# Altium integrated library FTSH-105-01-L-DV-007-K.IntLib: 1 symbol
Pins are listed as number, name and electrical type; pins without a type are passive.

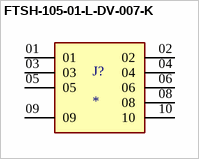
[diagram p0: symbol FTSH-105-01-L-DV-007-K]

## FTSH-105-01-L-DV-007-K
designator J?
Connector Header Surface Mount 10 position 0.050 (1.27mm); MF: Samtec; MP: FTSH-105-01-L-DV-007-K; SnapEDA_Link: https://www.snapeda.com/parts/FTSH-105-01-L-DV-007-K/Samtec+Inc./view-part/?ref=snap; Package: None; Value: *; Check_prices: https://www.snapeda.com/parts/FTSH-105-01-L-DV-007-K/Samtec+Inc./view-part/?ref=eda
footprint SAMTEC_FTSH-105-01-L-DV-007-K
pins: 01, 02, 03, 04, 05, 06, 08, 09, 10